# Altium footprint library ECU_Footprints.PcbLib: 6 footprints
Each footprint in its own frame and in the unit in brackets; x right, y up, seen from the top. Pads: shape width x height; smd on the part's side, far side on the other; paste and mask are expansions set on the pad; w line width, h text height; cw(c..) or ccw(c..) is an arc to the next point about the centre after c.
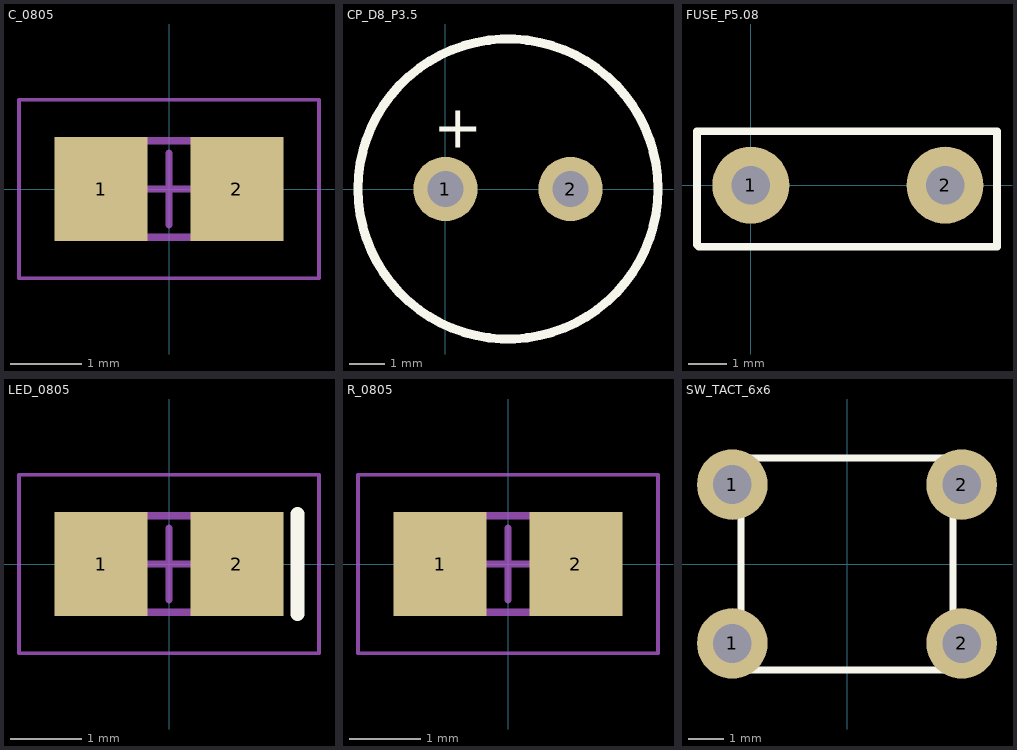
[diagram p0: the footprints below, top view; thin cyan lines are the x and y axes]

## C_0805 [mm] "Chip Capacitor, 2-Leads, Body 2.00x1.25mm, IPC Low Density"
height 0.6
pads (2):
  rect 1.3x1.45 smd: 1(-0.95,0) 2(0.95,0)
Mechanical 13:
  lines w0.1: -1.05,-0.675 -1.05,0.675 1.05,0.675 1.05,-0.675 -1.05,-0.675
Mechanical 15:
  lines w0.05: -2.1,-1.25 -2.1,1.25 2.1,1.25 2.1,-1.25 -2.1,-1.25
  lines w0.1: -0.5,0 0.5,0 ; 0,-0.5 0,0.5
3D body: height 0.6, standoff 0, extent -0.6,-0.675 0.6,0.675
3D body: height 0.6, standoff 0, extent -1.05,-0.675 -0.6,0.675
3D body: height 0.6, standoff 0, extent 0.6,-0.675 1.05,0.675

## CP_D8_P3.5 [mm]
pads (2):
  round 1.8 hole 1 square: 1(0,0)
  round 1.8 hole 1: 2(3.5,0)
Top Overlay:
  circle w0.254: c1.75,0 r4.197
  text "+" at -0.346,1.154 h1.2

## FUSE_P5.08 [mm]
pads (2):
  round 2 hole 1: 1(0,0) 2(5.05,0)
Top Overlay:
  lines w0.2: -1.4,-1.55 -1.4,1.4 6.4,1.4 6.4,-1.6 -1.35,-1.6 -1.4,-1.55

## LED_0805 [mm] "Chip Led, 2-Leads, Body 2.00x1.25mm, IPC Low Density"
height 0.6
pads (2):
  rect 1.3x1.45 smd: 1(-0.95,0) 2(0.95,0)
Top Overlay:
  lines w0.2: 1.8,-0.7 1.8,0.7
Mechanical 13:
  lines w0.1: -1.05,-0.675 1.05,-0.675 1.05,0.675 -1.05,0.675 -1.05,-0.675
Mechanical 15:
  lines w0.05: -2.1,-1.25 2.1,-1.25 2.1,1.25 -2.1,1.25 -2.1,-1.25
  lines w0.1: -0.5,0 0.5,0 ; 0,-0.5 0,0.5
3D body: height 0.6, standoff 0, extent 0.6,-0.675 1.05,0.675
3D body: height 0.6, standoff 0, extent -1.05,-0.675 -0.6,0.675
3D body: height 0.6, standoff 0, extent -0.6,-0.675 0.6,0.675

## R_0805 [mm] "Chip Resistor, 2-Leads, Body 2.00x1.25mm, IPC Low Density"
height 0.6
pads (2):
  rect 1.3x1.45 smd: 1(-0.95,0) 2(0.95,0)
Mechanical 13:
  lines w0.1: -1.05,-0.675 -1.05,0.675 1.05,0.675 1.05,-0.675 -1.05,-0.675
Mechanical 15:
  lines w0.05: -2.1,-1.25 -2.1,1.25 2.1,1.25 2.1,-1.25 -2.1,-1.25
  lines w0.1: -0.5,0 0.5,0 ; 0,-0.5 0,0.5
3D body: height 0.6, standoff 0, extent -0.6,-0.675 0.6,0.675
3D body: height 0.6, standoff 0, extent -1.05,-0.675 -0.6,0.675
3D body: height 0.6, standoff 0, extent 0.6,-0.675 1.05,0.675

## SW_TACT_6x6 [mm]
pads (4):
  round 2 hole 1.1: 1(-3.25,-2.25) 1(-3.25,2.25) 2(3.25,-2.25) 2(3.25,2.25)
Top Overlay:
  lines w0.2: -3,-3 -3,3 3,3 3,-3 -3,-3